# Altium schematic symbol library FM24CL64B-G.SchLib: 1 symbol
Pins are listed as number, name and electrical type; pins without a type are passive.

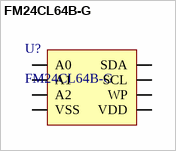
[diagram p0: symbol FM24CL64B-G]

## FM24CL64B-G
designator U?
IC: FRAM memory; 64kbFRAM; I2C; 8kx8bit; 2.7÷3.6VDC; 1MHz; SO8
footprint FM24CL64B-G (IC: FRAM memory; 64kbFRAM; I2C; 8kx8bit; 2.7÷3.6VDC; 1MHz; SO8)
pins: 1 A0, 2 A1, 3 A2, 4 VSS (power), 5 VDD (power), 6 WP, 7 SCL, 8 SDA